# Altium integrated library SMPS_SUPPLY.IntLib: 37 symbols
Pins are listed as number, name and electrical type; pins without a type are passive.

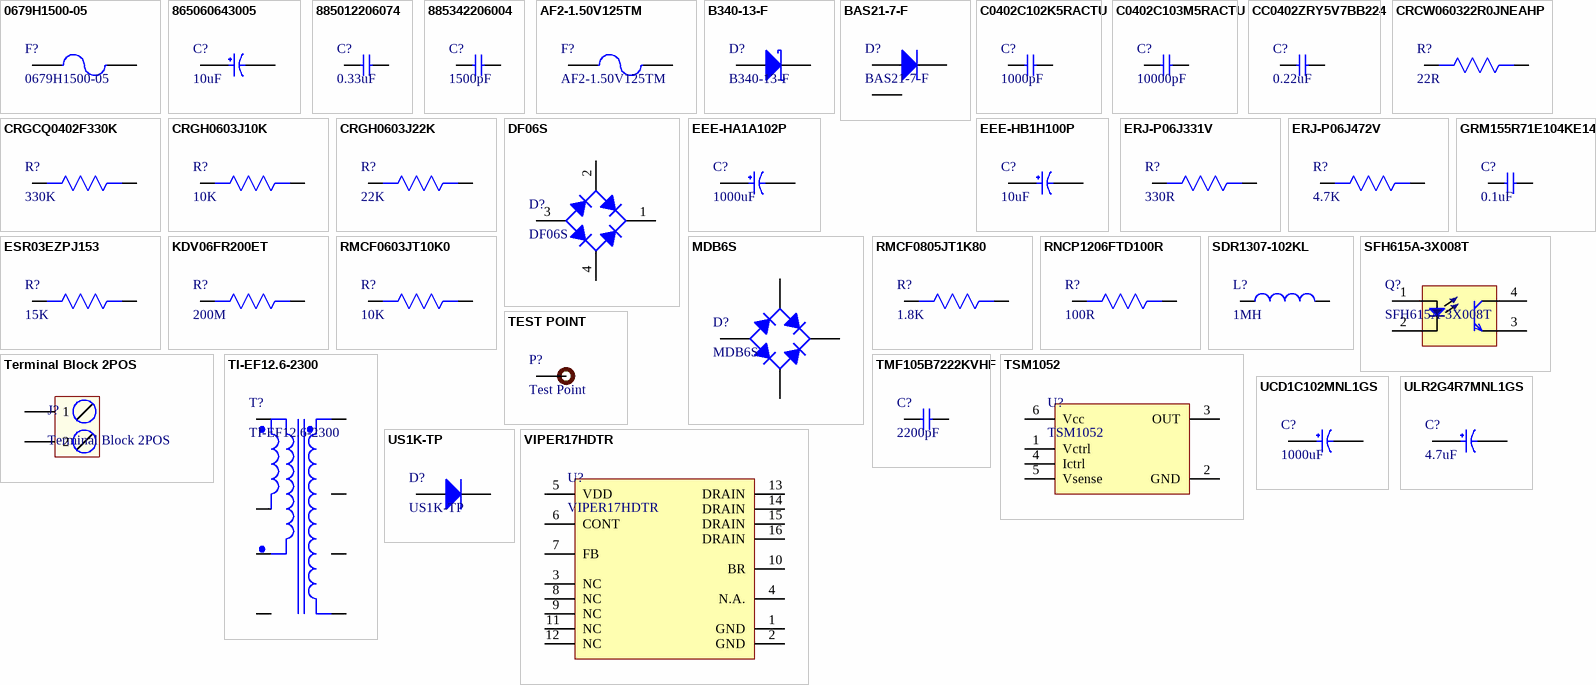
[diagram p0: symbols 0679H1500-05 to VIPER17HDTR]

## 0679H1500-05
designator F?
FUSE BOARD MNT 1.5A 350VAC 72VDC; Manufacturer: Bel; Fuse Type: Board Mount (Cartridge Style Excluded); Voltage Rating (AC): 350V; Voltage Rating (DC): 72V; DC Cold Resistance: 58mR; Approvals: cURus; Supplier 1: Digi-Key; Manufacturer Part Number: 0679H1500-05; Stock 1: 5370; Pricing 1: 1=0.34, 5=0.334, 10=0.319, 50=0.2848, 100=0.2651, 250=0.23564, 500=0.19636, 1000=0.18653 (USD); Mount: Surface Mount; Case/Package: 2410; Case Code (Imperial): 2410; Case Code (Metric): 6125; Min Operating Temperature: -55°C; Max Operating Temperature: 125°C; Packaging: Tape and Reel; Current Rating: 1.5A; ComponentLink1URL: https://www.belfuse.com/resources/CircuitProtection/datasheets/0679H%20Jan%202017.pdf?src-supplier=Digi-Key; ComponentLink1Description: https://www.belfuse.com/resources/CircuitProtection/datasheets/0679H%20Jan%202017.pdf?src-supplier=Digi-Key; Supplier Part Number 1: 507-2048-1-ND
footprint 0679H1500-05
pins: 1, 2

## 865060643005
designator C?, comment 10uF
CAP 10 UF 20% 50 V; Manufacturer: Wurth Electronics; Manufacturer Part Number: 865060643005; Voltage Rating: 50V; Polarity: Polar; Ripple Current: 165mA; Impedance: 1.4R; Life (Hours): 2000Hour; Supplier 1: Digi-Key; Stock 1: 518; Pricing 1: 1=0.27, 50=0.233, 100=0.203, 250=0.18, 500=0.158 (USD); Mount: Surface Mount; Case/Package: Radial; Min Operating Temperature: -55°C; Max Operating Temperature: 105°C; Package Quantity: 1000; Packaging: Cut Tape; Ripple Current (AC): 165mA; Tolerance: 20%; Voltage Rating (DC): 50V; Capacitance: 10uF; Diameter: 6.3mm; Height: 5.5mm; Height - Seated (Max): 0.217inch; REACH SVHC: Unknown; ComponentLink1URL: http://www.farnell.com/datasheets/1880073.pdf?src-supplier=Element14; ComponentLink1Description: http://www.farnell.com/datasheets/1880073.pdf?src-supplier=Element14; ComponentLink2URL: http://www.farnell.com/datasheets/1880073.pdf?src-supplier=Farnell; ComponentLink2Description: http://www.farnell.com/datasheets/1880073.pdf?src-supplier=Farnell; ComponentLink3URL: http://katalog.we-online.de/pbs/datasheet/865060643005.pdf?src-supplier=Digi-Key; ComponentLink3Description: http://katalog.we-online.de/pbs/datasheet/865060643005.pdf?src-supplier=Digi-Key; Supplier Part Number 1: 732-8545-1-ND
footprint 865060643005
pins: 1, 2

## 885012206074
designator C?, comment 0.33uF
CAP CER 0.33UF 25V X7R 0603; Manufacturer: Wurth Electronics; Manufacturer Part Number: 885012206074; Capacitance: 330nF; Tolerance: 10%; Supplier 1: Digi-Key; Stock 1: 20125; Pricing 1: 1=0.1, 10=0.08, 100=0.0721, 500=0.06376 (USD); Mount: Surface Mount; Case/Package: 0603; Case Code (Metric): 1608; Case Code (Imperial): 0603; Min Operating Temperature: -55°C; Max Operating Temperature: 125°C; Packaging: Tape and Reel; Voltage Rating: 25V; Length: 0.063inch; Width: 0.031inch; Thickness: 0.037inch; ComponentLink1URL: http://www.farnell.com/datasheets/2031845.pdf?src-supplier=Element14; ComponentLink1Description: http://www.farnell.com/datasheets/2031845.pdf?src-supplier=Element14; ComponentLink2URL: http://www.farnell.com/datasheets/2031845.pdf?src-supplier=Farnell; ComponentLink2Description: http://www.farnell.com/datasheets/2031845.pdf?src-supplier=Farnell; ComponentLink3URL: https://katalog.we-online.de/pbs/datasheet/885012206074.pdf?src-supplier=Digi-Key; ComponentLink3Description: https://katalog.we-online.de/pbs/datasheet/885012206074.pdf?src-supplier=Digi-Key; ComponentLink4URL: http://www.farnell.com/datasheets/2031845.pdf?src-supplier=Newark; ComponentLink4Description: http://www.farnell.com/datasheets/2031845.pdf?src-supplier=Newark; Supplier Part Number 1: 732-7992-1-ND
footprint Cap0603
pins: 1, 2

## 885342206004
designator C?, comment 1500pF
CAP CER 1500PF 250V X7R 0603; Manufacturer: Wurth Electronics; Manufacturer Part Number: 885342206004; Supplier 1: Digi-Key; Stock 1: 5280; Pricing 1: 1=0.1, 10=0.086, 100=0.0771, 500=0.06822 (USD); Supplier Part Number 1: 732-12172-1-ND
footprint Cap0603
pins: 1, 2

## AF2-1.50V125TM
designator F?
Chip Fuse Fast Blow 1.5A 62mΩ 100A AC，50A AC，50A DC 1.19 2410 Surface Mount Fuses RoHS; Manufacturer: AEM; Manufacturer Part No: AF2-1.50V125TM; Package: 2410; Value: *
footprint AF2-1.50V125TM
pins: 1, 2

## B340-13-F
designator D?
DIODE SCHOTTKY 40V 3A SMC; Manufacturer: Diodes; Element Configuration: Single; Peak Reverse Current: 500uA; Forward Voltage: 500mV; Max Forward Surge Current (Ifsm): 100A; Polarity: Standard; Capacitance: 250pF; Supplier 1: Digi-Key; Manufacturer Part Number: B340-13-F; Stock 1: 80823; Pricing 1: 1=0.35, 10=0.285, 25=0.2604, 100=0.1636, 250=0.1618, 500=0.1515, 1000=0.10302 (USD); Mount: Surface Mount; Case/Package: SMC; Number of Pins: 2; Weight: 0.007408oz; Min Operating Temperature: -55°C; Max Operating Temperature: 125°C; Forward Current: 3A; Max Repetitive Reverse Voltage (Vrrm): 40V; Packaging: Tape and Reel; Peak Non-Repetitive Surge Current: 100A; Package Quantity: 3000; Average Rectified Current: 3A; Termination: SMD/SMT; Voltage Rating (DC): 40V; Current Rating: 3A; Output Current: 3A; Max Reverse Voltage (DC): 40V; Current: 3A; Voltage: 40V; Length: 7.11mm; Height: 2.5mm; Width: 6.22mm; Radiation Hardening: No; Lead Free: Lead Free; REACH SVHC: No SVHC; ComponentLink1URL: https://www.diodes.com/assets/Datasheets/ds30923.pdf?src-supplier=Digi-Key; ComponentLink1Description: https://www.diodes.com/assets/Datasheets/ds30923.pdf?src-supplier=Digi-Key; ComponentLink2URL: http://www.diodes.com/datasheets/ds13005.pdf?src-supplier=Future+Electronics; ComponentLink2Description: http://www.diodes.com/datasheets/ds13005.pdf?src-supplier=Future+Electronics; ComponentLink3URL: https://www.verical.com/server-webapp/html/getDatasheet?partID=116064&src-supplier=Verical; ComponentLink3Description: https://www.verical.com/server-webapp/html/getDatasheet?partID=116064&src-supplier=Verical; Supplier Part Number 1: B340-FDICT-ND
footprint SMC
pins: 1 A, 2 K

## BAS21-7-F
designator D?
DIODE GEN PURP 200V 200MA SOT23; Manufacturer: Diodes; Forward Current: 400mA; Peak Reverse Current: 100nA; Reverse Recovery Time: 50ns; Peak Non-Repetitive Surge Current: 2.5A; Max Repetitive Reverse Voltage (Vrrm): 250V; Element Configuration: Single; Forward Voltage: 1.25V; Power Dissipation: 250mW; Polarity: Standard; Power Rating: 350mW; Capacitance: 5pF; Supplier 1: Digi-Key; Manufacturer Part Number: BAS21-7-F; Stock 1: 164018; Pricing 1: 1=0.13, 10=0.119, 25=0.1136, 100=0.05, 250=0.048, 500=0.03926, 1000=0.02727 (USD); Mount: Surface Mount; Case/Package: SOT-23; Number of Pins: 3; Weight: 0.000282oz; Contact Plating: Tin,Matte; Min Operating Temperature: -65°C; Max Operating Temperature: 150°C; Packaging: Tape and Reel; Max Surge Current: 2.5A; Recovery Time: 50ns; Package Quantity: 3000; Average Rectified Current: 200mA; Output Current: 200mA; Voltage: 250V; Max Reverse Voltage (DC): 200V; Length: 3.05mm; Height: 1mm; Width: 1.4mm; Radiation Hardening: No; Lead Free: Lead Free; ComponentLink1URL: https://www.verical.com/server-webapp/html/getDatasheet?partID=143369&src-supplier=Verical; ComponentLink1Description: https://www.verical.com/server-webapp/html/getDatasheet?partID=143369&src-supplier=Verical; ComponentLink2URL: http://www.diodes.com/datasheets/ds12004.pdf?src-supplier=Avnet+Asia; ComponentLink2Description: http://www.diodes.com/datasheets/ds12004.pdf?src-supplier=Avnet+Asia; ComponentLink3URL: http://www.diodes.com/datasheets/ds12004.pdf?src-supplier=Avnet+Europe; ComponentLink3Description: http://www.diodes.com/datasheets/ds12004.pdf?src-supplier=Avnet+Europe; ComponentLink4URL: http://www.diodes.com/datasheets/ds12004.pdf?src-supplier=Avnet; ComponentLink4Description: http://www.diodes.com/datasheets/ds12004.pdf?src-supplier=Avnet; ComponentLink5URL: http://www.diodes.com/datasheets/ds12004.pdf?src-supplier=Future+Electronics; ComponentLink5Description: http://www.diodes.com/datasheets/ds12004.pdf?src-supplier=Future+Electronics; ComponentLink6URL: https://www.diodes.com/assets/Datasheets/Ds12004.pdf?src-supplier=Digi-Key; ComponentLink6Description: https://www.diodes.com/assets/Datasheets/Ds12004.pdf?src-supplier=Digi-Key; Supplier Part Number 1: BAS21-FDICT-ND
footprint SOT23-3 (SOT23, 3-Leads, Body 2.9x1.3mm, Pitch 0.95mm, Lead Span 2.3mm - Reverse Pinning, IPC High Density)
pins: 1 A, 2 NC, 3 K

## C0402C102K5RACTU
designator C?, comment 1000pF
CAP CER 1000PF 50V X7R 0402; Manufacturer: KEMET; Manufacturer Part Number: C0402C102K5RACTU; Dielectric Material: Ceramic; Capacitance: 1nF; Tolerance: 10%; Dissipation Factor: 2.5%; Supplier 1: Digi-Key; Stock 1: 1339158; Pricing 1: 1=0.1, 10=0.022, 100=0.0099, 500=0.00708, 1000=0.00557, 2500=0.00506, 5000=0.00466 (USD); Mount: Surface Mount,PCB; Case/Package: 0402; Number of Pins: 2; Case Code (Metric): 1005; Case Code (Imperial): 0402; Min Operating Temperature: -55°C; Max Operating Temperature: 125°C; Packaging: Tape and Reel; Voltage Rating (DC): 50V; Dielectric: X7R; Package Quantity: 10000; Voltage Rating: 50V; Termination: SMD/SMT; Voltage: 50V; Length: 1mm; Height: 0.5mm; Width: 0.5mm; Thickness: 0.022inch; Lead Pitch: 0.3mm; Depth: 0.5mm; Radiation Hardening: No; REACH SVHC: No SVHC; ComponentLink1URL: http://www.onlinecomponents.com/productFiles/mf-KEM/docfinderpartnumberc0402c102k5ractu.pdf?src-supplier=Onlinecomponents.com; ComponentLink1Description: http://www.onlinecomponents.com/productFiles/mf-KEM/docfinderpartnumberc0402c102k5ractu.pdf?src-supplier=Onlinecomponents.com; ComponentLink2URL: http://www.alliedelec.com/m/d/9bfe7773041ffe9d406e68bc7b377fdd.pdf?src-supplier=Allied+Electronics; ComponentLink2Description: http://www.alliedelec.com/m/d/9bfe7773041ffe9d406e68bc7b377fdd.pdf?src-supplier=Allied+Electronics; ComponentLink3URL: http://www.farnell.com/datasheets/2740642.pdf?src-supplier=Element14; ComponentLink3Description: http://www.farnell.com/datasheets/2740642.pdf?src-supplier=Element14; ComponentLink4URL: http://www.kemet.com/kemet/web/homepage/kechome.nsf/vapubfiles/KEM_C1002_X7R_SMD.pdf/$file/KEM_C1002_X7R_SMD.pdf?src-supplier=Farnell; ComponentLink4Description: http://www.kemet.com/kemet/web/homepage/kechome.nsf/vapubfiles/KEM_C1002_X7R_SMD.pdf/$file/KEM_C1002_X7R_SMD.pdf?src-supplier=Farnell; ComponentLink5URL: http://www.farnell.com/datasheets/1918693.pdf?src-supplier=Element14; ComponentLink5Description: http://www.farnell.com/datasheets/1918693.pdf?src-supplier=Element14; ComponentLink6URL: http://www.mouser.com/ds/2/212/KEM_C1002_X7R_SMD-1102033.pdf?src-supplier=Mouser; ComponentLink6Description: http://www.mouser.com/ds/2/212/KEM_C1002_X7R_SMD-1102033.pdf?src-supplier=Mouser; Supplier Part Number 1: 399-1032-1-ND
footprint Cap0402
pins: 1, 2

## C0402C103M5RACTU
designator C?, comment 10000pF
CAP CER 10000PF 50V X7R 0402; Manufacturer: KEMET; Manufacturer Part Number: C0402C103M5RACTU; Dielectric Material: Ceramic; Capacitance: 10nF; Tolerance: 20%; Dissipation Factor: 2.5%; Supplier 1: Digi-Key; Stock 1: 100871; Pricing 1: 1=0.1, 10=0.022, 100=0.0099, 500=0.00708, 1000=0.00557, 2500=0.00506, 5000=0.00466 (USD); Mount: Surface Mount; Case/Package: 0402; Case Code (Metric): 1005; Case Code (Imperial): 0402; Min Operating Temperature: -55°C; Max Operating Temperature: 125°C; Voltage Rating: 50V; Packaging: Tape and Reel; Package Quantity: 10000; Voltage Rating (DC): 50V; Dielectric: X7R; Termination: SMD/SMT; Length: 1mm; Height: 0.5mm; Width: 0.02inch; Thickness: 0.022inch; Lead Pitch: 0.3mm; Depth: 0.5mm; Radiation Hardening: No; ComponentLink1URL: https://www.verical.com/server-webapp/html/getDatasheet?partID=439437&src-supplier=Verical; ComponentLink1Description: https://www.verical.com/server-webapp/html/getDatasheet?partID=439437&src-supplier=Verical; ComponentLink2URL: http://www.mouser.com/ds/2/212/KEM_C1002_X7R_SMD-1102033.pdf?src-supplier=Mouser; ComponentLink2Description: http://www.mouser.com/ds/2/212/KEM_C1002_X7R_SMD-1102033.pdf?src-supplier=Mouser; Supplier Part Number 1: 399-7760-1-ND
footprint Cap0402
pins: 1, 2

## CC0402ZRY5V7BB224
designator C?, comment 0.22uF
CAP CER 0.22UF 16V Y5V 0402; Manufacturer: Yageo; Manufacturer Part Number: CC0402ZRY5V7BB224; Capacitance: 220nF; Tolerance: 80%; Supplier 1: Digi-Key; Stock 1: 177873; Pricing 1: 1=0.1, 10=0.073, 100=0.0327, 500=0.02336, 1000=0.01836, 2500=0.01669, 5000=0.01536 (USD); Mount: Surface Mount; Case/Package: 0402; Number of Pins: 2; Weight: 2.3E-05oz; Case Code (Imperial): 0402; Case Code (Metric): 1005; Min Operating Temperature: -30°C; Max Operating Temperature: 85°C; Voltage Rating: 16V; Voltage Rating (DC): 16V; Packaging: Tape and Reel; Package Quantity: 1; Dielectric: Y5V; Termination: SMD/SMT; Composition: Ceramic; Length: 1mm; Width: 0.5mm; Thickness: 0.022inch; Depth: 0.5mm; Lead Free: Lead Free; Halogen Free: Halogen Free; ComponentLink1URL: http://www.yageo.com/documents/recent/UPY-GPHC_Y5V_6.3V-to-50V_8.pdf?src-supplier=Digi-Key; ComponentLink1Description: http://www.yageo.com/documents/recent/UPY-GPHC_Y5V_6.3V-to-50V_8.pdf?src-supplier=Digi-Key; ComponentLink2URL: http://media.digikey.com/pdf/Data%20Sheets/Yageo%20PDFs/MLCC%20ordering%20code.pdf?src-supplier=Digi-Key; ComponentLink2Description: http://media.digikey.com/pdf/Data%20Sheets/Yageo%20PDFs/MLCC%20ordering%20code.pdf?src-supplier=Digi-Key; Supplier Part Number 1: 311-1350-1-ND
footprint Cap0402
pins: 1, 2

## CRCW060322R0JNEAHP
designator R?, comment 22R
RES SMD 22 OHM 5% 1/3W 0603; Manufacturer: Vishay Dale; Manufacturer Part Number: CRCW060322R0JNEAHP; Temperature Coefficient: 200ppm/°C; Power Rating: 250mW; Voltage Rating: 75V; Supplier 1: Digi-Key; Stock 1: 245392; Pricing 1: 1=0.15, 10=0.129, 100=0.0506, 1000=0.02119, 2500=0.01942 (USD); Mount: Surface Mount; Case/Package: 0603; Weight: 7.1E-05oz; Contact Plating: Tin; Case Code (Imperial): 0603; Case Code (Metric): 1608; Min Operating Temperature: -55°C; Max Operating Temperature: 155°C; Resistance: 22R; Tolerance: 5%; Composition: Thick Film; Packaging: Tape and Reel; Package Quantity: 5000; Military Standard: Not; Length: 1.6mm; Height: 0.45mm; Width: 0.8mm; Depth: 0.85mm; Radiation Hardening: No; Lead Free: Lead Free; ComponentLink1URL: http://www.vishay.com/docs/20043/crcwhpe3.pdf?src-supplier=Avnet+Europe; ComponentLink1Description: http://www.vishay.com/docs/20043/crcwhpe3.pdf?src-supplier=Avnet+Europe; ComponentLink2URL: http://www.mouser.com/ds/2/427/dcrcwe3-109170.pdf?src-supplier=Mouser; ComponentLink2Description: http://www.mouser.com/ds/2/427/dcrcwe3-109170.pdf?src-supplier=Mouser; Supplier Part Number 1: 541-22SACT-ND
footprint Res0603
pins: 1, 2

## CRGCQ0402F330K
designator R?, comment 330K
CRGCQ 0402 330K 1%; Manufacturer: TE Connectivity; Manufacturer Part Number: CRGCQ0402F330K; Supplier 1: Digi-Key; Stock 1: 159390; Pricing 1: 1=0.1, 10=0.021, 100=0.0086, 1000=0.00387, 2500=0.00336, 5000=0.00277 (USD); ComponentLink1URL: https://www.te.com/commerce/DocumentDelivery/DDEController?Action=srchrtrv&amp;DocNm=1773204-3&amp;DocType=DS&amp;DocLang=English&src-supplier=Digi-Key; ComponentLink1Description: https://www.te.com/commerce/DocumentDelivery/DDEController?Action=srchrtrv&amp;DocNm=1773204-3&amp;DocType=DS&amp;DocLang=English&src-supplier=Digi-Key; ComponentLink2URL: https://4donline.ihs.com/images/VipMasterIC/IC/TYEL/TYEL-S-A0004929575/TYEL-S-A0004929575-1.pdf?hkey=52A5661711E402568146F3353EA87419&src-supplier=Element14; ComponentLink2Description: https://4donline.ihs.com/images/VipMasterIC/IC/TYEL/TYEL-S-A0004929575/TYEL-S-A0004929575-1.pdf?hkey=52A5661711E402568146F3353EA87419&src-supplier=Element14; Supplier Part Number 1: A129657CT-ND
footprint Res0402
pins: 1, 2

## CRGH0603J10K
designator R?, comment 10K
RES SMD 10K OHM 5% 1/5W 0603; Manufacturer: TE Connectivity Holsworthy; Manufacturer Part Number: CRGH0603J10K; Resistance: 10kR; Temperature Coefficient: 100ppm/°C; Power Rating: 200mW; Voltage Rating: 50V; Number of Resistors: 1; Supplier 1: Digi-Key; Stock 1: 55163; Pricing 1: 1=0.1, 10=0.047, 100=0.0192, 1000=0.00861, 2500=0.00748 (USD); Mount: Surface Mount; Case/Package: 0603; Case Code (Imperial): 0603; Case Code (Metric): 1608; Min Operating Temperature: -55°C; Max Operating Temperature: 125°C; Tolerance: 5%; Packaging: Tape and Reel; Composition: Thick Film,Power resistor; Number of Terminations: 2; Termination: Solder; Voltage Rating (DC): 50V; Length: 1.6mm; Height: 0.45mm; Width: 0.8mm; Depth: 0.8mm; REACH SVHC: No SVHC; ELV: Compliant; ComponentLink1URL: http://www.farnell.com/datasheets/2007183.pdf?src-supplier=Element14; ComponentLink1Description: http://www.farnell.com/datasheets/2007183.pdf?src-supplier=Element14; Supplier Part Number 1: A126394CT-ND
footprint Res0603
pins: 1, 2

## CRGH0603J22K
designator R?, comment 22K
RES SMD 22K OHM 5% 1/5W 0603; Manufacturer: TE Connectivity; Manufacturer Part Number: CRGH0603J22K; Resistance: 22kR; Temperature Coefficient: 100ppm/°C; Power Rating: 200mW; Voltage Rating: 50V; Number of Resistors: 1; Supplier 1: Digi-Key; Stock 1: 19298; Pricing 1: 1=0.1, 10=0.047, 100=0.0192, 1000=0.00861, 2500=0.00748 (USD); Mount: Surface Mount; Case/Package: 0603; Weight: 7.1E-05oz; Case Code (Imperial): 0603; Case Code (Metric): 1608; Min Operating Temperature: -55°C; Max Operating Temperature: 125°C; Tolerance: 5%; Packaging: Tape and Reel; Composition: Thick Film,Power resistor; Package Quantity: 5000; Number of Terminations: 2; Termination: Solder; Voltage Rating (DC): 50V; Length: 1.6mm; Height: 0.45mm; Width: 0.8mm; Depth: 0.8mm; REACH SVHC: No SVHC; ELV: Compliant; ComponentLink1URL: http://www.farnell.com/datasheets/2007183.pdf?src-supplier=Element14; ComponentLink1Description: http://www.farnell.com/datasheets/2007183.pdf?src-supplier=Element14; ComponentLink2URL: http://www.mouser.com/ds/2/418/NG_DS_1773204-1_C-729102.pdf?src-supplier=Mouser; ComponentLink2Description: http://www.mouser.com/ds/2/418/NG_DS_1773204-1_C-729102.pdf?src-supplier=Mouser; Supplier Part Number 1: A126403CT-ND
footprint Res0603
pins: 1, 2

## DF06S
designator D?
BRIDGE RECT 1PHASE 600V 1A DF-S; Manufacturer: ON Semiconductor / Fairchild; Forward Voltage: 1.1V; Peak Reverse Current: 5uA; Peak Non-Repetitive Surge Current: 50A; Element Configuration: Single; Number of Elements: 1; Forward Current: 1.5A; Capacitance: 1nF; Max Reverse Leakage Current: 50uA; Tolerance: 5%; Voltage Rating: 100V; Power Dissipation: 3.1W; Supplier 1: Digi-Key; Manufacturer Part Number: DF06S; Stock 1: 3050; Pricing 1: 1=0.5, 10=0.425, 25=0.3964, 100=0.2946, 500=0.23 (USD); Mount: Through Hole; Case/Package: SMD/SMT; Number of Pins: 4; Weight: 0.484g; Case Code (Metric): 1608; Case Code (Imperial): 0603; Min Operating Temperature: -55°C; Max Operating Temperature: 150°C; Packaging: Tape and Reel; Max Repetitive Reverse Voltage (Vrrm): 600V; Max Surge Current: 50A; Package Quantity: 10000; Current Rating: 1.5A; Voltage Rating (DC): 600V; Output Current: 1.5A; Max Forward Surge Current (Ifsm): 50A; Average Rectified Current: 1.5A; Termination: SMD/SMT; Max Power Dissipation: 3.1W; Length: 0.063inch; Height: 3.3mm; Width: 6.5mm; Thickness: 0.035inch; Radiation Hardening: No; Lead Free: Lead Free; REACH SVHC: No SVHC; ComponentLink1URL: http://www.farnell.com/datasheets/2161293.pdf?src-supplier=Element14; ComponentLink1Description: http://www.farnell.com/datasheets/2161293.pdf?src-supplier=Element14; ComponentLink2URL: https://www.fairchildsemi.com/datasheets/DF/DF08S.pdf?src-supplier=Avnet; ComponentLink2Description: https://www.fairchildsemi.com/datasheets/DF/DF08S.pdf?src-supplier=Avnet; ComponentLink3URL: http://www.fairchildsemi.com/ds/DF/DF08S.pdf?src-supplier=Avnet+Europe; ComponentLink3Description: http://www.fairchildsemi.com/ds/DF/DF08S.pdf?src-supplier=Avnet+Europe; ComponentLink4URL: http://www.fairchildsemi.com/ds/DF/DF06S.pdf?src-supplier=Future+Electronics; ComponentLink4Description: http://www.fairchildsemi.com/ds/DF/DF06S.pdf?src-supplier=Future+Electronics; ComponentLink5URL: https://www.fairchildsemi.com/datasheets/DF/DF005S.pdf?src-supplier=Digi-Key; ComponentLink5Description: https://www.fairchildsemi.com/datasheets/DF/DF005S.pdf?src-supplier=Digi-Key; ComponentLink6URL: http://www.mouser.com/ds/2/149/DF06S-190284.pdf?src-supplier=Mouser; ComponentLink6Description: http://www.mouser.com/ds/2/149/DF06S-190284.pdf?src-supplier=Mouser; ComponentLink7URL: http://datasheet.iiic.cc/fairchild/DF06S.pdf?src-supplier=IIIC; ComponentLink7Description: http://datasheet.iiic.cc/fairchild/DF06S.pdf?src-supplier=IIIC; Supplier Part Number 1: DF06SCT-ND
footprint DF-S
pins: 1 +, 2 -, 3 ~, 4 ~

## EEE-HA1A102P
designator C?, comment 1000uF
CAP ALUM 1000UF 20% 10V SMD; Manufacturer: Panasonic; Manufacturer Part Number: EEE-HA1A102P; Capacitance: 1mF; Ripple Current: 400mA; Polarity: Polar; Life (Hours): 1000Hour; Lead Diameter: 0.9mm; Supplier 1: Digi-Key; Stock 1: 7455; Pricing 1: 1=0.68, 10=0.502, 50=0.4014, 100=0.344 (USD); Mount: Surface Mount,PCB; Case/Package: Radial; Contact Plating: Tin; Min Operating Temperature: -40°C; Max Operating Temperature: 105°C; Tolerance: 20%; Voltage Rating: 10V; Packaging: Tape and Reel; Package Quantity: 500; Ripple Current (AC): 400mA; Voltage Rating (DC): 10V; Termination: SMD/SMT; Voltage: 10V; Diameter: 10mm; Length: 10.5mm; Height: 10.2mm; Lead Pitch: 4.6mm; Height - Seated (Max): 0.402inch; Width: 900um; Radiation Hardening: No; REACH SVHC: No SVHC; Lead Free: Lead Free; ComponentLink1URL: https://industrial.panasonic.com/cdbs/www-data/pdf/RDE0000/ABA0000C1151.pdf?src-supplier=Digi-Key; ComponentLink1Description: https://industrial.panasonic.com/cdbs/www-data/pdf/RDE0000/ABA0000C1151.pdf?src-supplier=Digi-Key; ComponentLink2URL: http://www.farnell.com/datasheets/1446029.pdf?src-supplier=Farnell; ComponentLink2Description: http://www.farnell.com/datasheets/1446029.pdf?src-supplier=Farnell; ComponentLink3URL: https://www.alliedelec.com/m/d/7ecf71cebe655f70ab90926cc286bede.pdf?src-supplier=Allied+Electronics; ComponentLink3Description: https://www.alliedelec.com/m/d/7ecf71cebe655f70ab90926cc286bede.pdf?src-supplier=Allied+Electronics; ComponentLink4URL: http://industrial.panasonic.com/www-data/pdf/ABA0000/ABA0000CE3.pdf?src-supplier=Future+Electronics; ComponentLink4Description: http://industrial.panasonic.com/www-data/pdf/ABA0000/ABA0000CE3.pdf?src-supplier=Future+Electronics; ComponentLink5URL: http://www.mouser.com/ds/2/315/ABA0000C1151-947454.pdf?src-supplier=Mouser; ComponentLink5Description: http://www.mouser.com/ds/2/315/ABA0000C1151-947454.pdf?src-supplier=Mouser; ComponentLink6URL: http://industrial.panasonic.com/www-data/pdf/ABA0000/ABA0000CE3.pdf?src-supplier=Avnet; ComponentLink6Description: http://industrial.panasonic.com/www-data/pdf/ABA0000/ABA0000CE3.pdf?src-supplier=Avnet; ComponentLink7URL: http://uk.rs-online.com/webdocs/102e/0900766b8102e3f9.pdf?src-supplier=RSComponents; ComponentLink7Description: http://uk.rs-online.com/webdocs/102e/0900766b8102e3f9.pdf?src-supplier=RSComponents; ComponentLink8URL: http://www.farnell.com/datasheets/1446029.pdf?src-supplier=Element14; ComponentLink8Description: http://www.farnell.com/datasheets/1446029.pdf?src-supplier=Element14; Supplier Part Number 1: PCE4170CT-ND
footprint EEE-HA1A102P
pins: 1, 2

## EEE-HB1H100P
designator C?, comment 10uF
CAP ALUM 10UF 20% 50V SMD; Manufacturer: Panasonic; Manufacturer Part Number: EEE-HB1H100P; Dielectric Material: Aluminium; Ripple Current: 35mA; Life (Hours): 2000Hour; Leakage Current: 3uA; Lead Length: 2.6mm; Supplier 1: Digi-Key; Stock 1: 0; Pricing 1: 1=0.4, 10=0.274, 50=0.1922, 100=0.1647, 500=0.1235 (USD); Mount: Surface Mount,PCB; Case/Package: Radial; Number of Pins: 2; Contact Plating: Tin; Min Operating Temperature: -40°C; Max Operating Temperature: 105°C; Capacitance: 10uF; Tolerance: 20%; Voltage Rating: 50V; Voltage Rating (DC): 50V; Packaging: Tape and Reel; Package Quantity: 1000; Ripple Current (AC): 35mA; Termination: SMD/SMT; Voltage: 50V; Diameter: 6.3mm; Length: 5.5mm; Height: 5.8mm; Height - Seated (Max): 0.228inch; Width: 6.6mm; Lead Pitch: 1.8mm; Radiation Hardening: No; REACH SVHC: No SVHC; Lead Free: Lead Free; ComponentLink1URL: http://uk.rs-online.com/webdocs/06bc/0900766b806bc524.pdf?src-supplier=RSComponents; ComponentLink1Description: http://uk.rs-online.com/webdocs/06bc/0900766b806bc524.pdf?src-supplier=RSComponents; ComponentLink2URL: https://www.alliedelec.com/m/d/756682ced85e7cfe6c5a2ad13d4eb8bb.pdf?src-supplier=Allied+Electronics; ComponentLink2Description: https://www.alliedelec.com/m/d/756682ced85e7cfe6c5a2ad13d4eb8bb.pdf?src-supplier=Allied+Electronics; ComponentLink3URL: http://industrial.panasonic.com/www-data/pdf/ABA0000/ABA0000CE4.pdf?src-supplier=Avnet+Europe; ComponentLink3Description: http://industrial.panasonic.com/www-data/pdf/ABA0000/ABA0000CE4.pdf?src-supplier=Avnet+Europe; ComponentLink4URL: https://industrial.panasonic.com/cdbs/www-data/pdf/RDE0000/ABA0000C1157.pdf?src-supplier=Future+Electronics; ComponentLink4Description: https://industrial.panasonic.com/cdbs/www-data/pdf/RDE0000/ABA0000C1157.pdf?src-supplier=Future+Electronics; ComponentLink5URL: https://www.verical.com/server-webapp/html/getDatasheet?partID=52285&src-supplier=Verical; ComponentLink5Description: https://www.verical.com/server-webapp/html/getDatasheet?partID=52285&src-supplier=Verical; ComponentLink6URL: http://industrial.panasonic.com/www-data/pdf/ABA0000/ABA0000CE4.pdf?src-supplier=Avnet; ComponentLink6Description: http://industrial.panasonic.com/www-data/pdf/ABA0000/ABA0000CE4.pdf?src-supplier=Avnet; Supplier Part Number 1: PCE4143CT-ND
footprint EEE-HB1H100P
pins: 1, 2

## ERJ-P06J331V
designator R?, comment 330R
RES SMD 330 OHM 5% 1/2W 0805
footprint RES 0805 (SMD 0805)
pins: 1, 2

## ERJ-P06J472V
designator R?, comment 4.7K
RES SMD 4.7K OHM 5% 1/2W 0805; Manufacturer: Panasonic; Manufacturer Part Number: ERJ-P06J472V; Resistance: 4.7kR; Temperature Coefficient: 200ppm/°C; Power Rating: 500mW; Voltage Rating: 400V; Voltage Rating (DC): 150V; Supplier 1: Digi-Key; Stock 1: 52373; Pricing 1: 1=0.11, 10=0.103, 100=0.0396, 1000=0.01742, 2500=0.01505 (USD); Mount: Surface Mount; Case/Package: 0805; Contact Plating: Tin; Case Code (Imperial): 0805; Case Code (Metric): 2012; Min Operating Temperature: -55°C; Max Operating Temperature: 155°C; Tolerance: 5%; Composition: Thick Film; Packaging: Tape and Reel; Package Quantity: 1; Termination: SMD/SMT; Number of Terminations: 2; Military Standard: Not; Max Power Dissipation: 500mW; Features: Automotive AEC-Q200; Length: 2mm; Height: 0.6mm; Width: 1.2mm; Depth: 1.25mm; Radiation Hardening: No; REACH SVHC: Unknown; Lead Free: Lead Free; ComponentLink1URL: http://industrial.panasonic.com/www-data/pdf/AOA0000/AOA0000CE4.pdf?src-supplier=Avnet+Europe; ComponentLink1Description: http://industrial.panasonic.com/www-data/pdf/AOA0000/AOA0000CE4.pdf?src-supplier=Avnet+Europe; ComponentLink2URL: http://uk.rs-online.com/webdocs/12cb/0900766b812cb812.pdf?src-supplier=RSComponents; ComponentLink2Description: http://uk.rs-online.com/webdocs/12cb/0900766b812cb812.pdf?src-supplier=RSComponents; ComponentLink3URL: https://www.alliedelec.com/m/d/12e4be79354a6c30aae91f11e8182ea0.pdf?src-supplier=Allied+Electronics; ComponentLink3Description: https://www.alliedelec.com/m/d/12e4be79354a6c30aae91f11e8182ea0.pdf?src-supplier=Allied+Electronics; ComponentLink4URL: http://www.farnell.com/datasheets/2059624.pdf?src-supplier=Element14; ComponentLink4Description: http://www.farnell.com/datasheets/2059624.pdf?src-supplier=Element14; Supplier Part Number 1: P4.7KADCT-ND
footprint RES 0805 (SMD 0805)
pins: 1, 2

## ESR03EZPJ153
designator R?, comment 15K
RES SMD 15K OHM 5% 1/4W 0603; Manufacturer: Rohm; Manufacturer Part Number: ESR03EZPJ153; Resistance: 15kR; Max Power Dissipation: 250mW; Temperature Coefficient: 200ppm/°C; Supplier 1: Digi-Key; Stock 1: 3694; Pricing 1: 1=0.1, 10=0.079, 100=0.0303, 1000=0.01331, 2500=0.0115 (USD); Case/Package: 0603; Case Code (Metric): 1608; Case Code (Imperial): 0603; Min Operating Temperature: -55°C; Max Operating Temperature: 155°C; Package Quantity: 1; Tolerance: 5%; Packaging: Tape and Reel; Composition: Thick Film; Number of Terminations: 2; Features: Automotive AEC-Q200; Length: 0.063inch; Height: 0.022inch; Width: 0.031inch; ComponentLink1URL: http://www.rohm.com/web/global/datasheet/ESR01MZPF/esr-e?src-supplier=Digi-Key; ComponentLink1Description: http://www.rohm.com/web/global/datasheet/ESR01MZPF/esr-e?src-supplier=Digi-Key; Supplier Part Number 1: RHM15KDCT-ND
footprint Res0603
pins: 1, 2

## GRM155R71E104KE14J
designator C?, comment 0.1uF
CAP CER 0.1UF 25V X7R 0402; Manufacturer: Murata; Manufacturer Part Number: GRM155R71E104KE14J; Capacitance: 100nF; Tolerance: 10%; Supplier 1: Digi-Key; Stock 1: 175947; Pricing 1: 1=0.1, 10=0.031, 100=0.0136, 500=0.00974, 1000=0.00765, 2500=0.00696, 5000=0.0064 (USD); Mount: Surface Mount; Case/Package: 0402; Weight: 0.000212oz; Case Code (Imperial): 0402; Case Code (Metric): 1005; Min Operating Temperature: -55°C; Max Operating Temperature: 125°C; Packaging: Tape and Reel; Voltage Rating: 25V; Dielectric: X7R; Termination: SMD/SMT; Composition: Ceramic; Voltage Rating (DC): 25V; Package Quantity: 50000; Length: 0.039inch; Height: 0.5mm; Width: 0.5mm; Thickness: 0.022inch; ComponentLink1URL: http://www.mouser.com/ds/2/281/c02e-2905.pdf?src-supplier=Mouser; ComponentLink1Description: http://www.mouser.com/ds/2/281/c02e-2905.pdf?src-supplier=Mouser; ComponentLink2URL: http://search.murata.co.jp/Ceramy/image/img/A01X/G101/ENG/GRM155R71E104KE14-01.pdf?src-supplier=Digi-Key; ComponentLink2Description: http://search.murata.co.jp/Ceramy/image/img/A01X/G101/ENG/GRM155R71E104KE14-01.pdf?src-supplier=Digi-Key; Supplier Part Number 1: 490-14603-1-ND
footprint Cap0402
pins: 1, 2

## KDV06FR200ET
designator R?, comment 200M
RES 200M OHM 1% 1/5W 0603; Manufacturer: Ohmite; Manufacturer Part Number: KDV06FR200ET; Supplier 1: Digi-Key; Stock 1: 3690; Pricing 1: 1=0.29, 10=0.242, 25=0.176, 50=0.1276, 100=0.0946, 250=0.0726, 500=0.0572, 1000=0.0396 (USD); Supplier Part Number 1: 273-KDV06FR200ETCT-ND
footprint Res0603
pins: 1, 2

## MDB6S
designator D?
BRIDGE RECT 1P 600V 1A MICRODIP
footprint 4-MicroDIP/SMD
pins: 1 +, 2 -, 3 C, 4 C

## RMCF0603JT10K0
designator R?, comment 10K
RES 10K OHM 5% 1/10W 0603; Manufacturer: Stackpole Electronics; Manufacturer Part Number: RMCF0603JT10K0; Power Rating: 100mW; Resistance: 10kR; Temperature Coefficient: 100ppm/°C; Supplier 1: Digi-Key; Stock 1: 2393993; Pricing 1: 1=0.1, 10=0.014, 100=0.0058, 1000=0.00262, 2500=0.00228 (USD); Mount: Surface Mount; Case/Package: 0603; Case Code (Metric): 1608; Case Code (Imperial): 0603; Contact Plating: Tin,Matte; Min Operating Temperature: -55°C; Max Operating Temperature: 155°C; Tolerance: 5%; Packaging: Tape and Reel; Composition: Thick Film; Number of Terminations: 2; Military Standard: Not; Max Power Dissipation: 100mW; Features: Automotive AEC-Q200; Length: 1.55mm; Height: 0.022inch; Width: 0.031inch; Depth: 0.8mm; Radiation Hardening: No; Lead Free: Lead Free; ComponentLink1URL: https://www.verical.com/server-webapp/html/getDatasheet?partID=364254&src-supplier=Verical; ComponentLink1Description: https://www.verical.com/server-webapp/html/getDatasheet?partID=364254&src-supplier=Verical; Supplier Part Number 1: RMCF0603JT10K0CT-ND
footprint Res0603
pins: 1, 2

## RMCF0805JT1K80
designator R?, comment 1.8K
RES 1.8K OHM 5% 1/8W 0805; Manufacturer: Stackpole Electronics; Manufacturer Part Number: RMCF0805JT1K80; Resistance: 1.8kR; Max Power Dissipation: 125mW; Temperature Coefficient: 200ppm/°C; Supplier 1: Digi-Key; Stock 1: 63219; Pricing 1: 1=0.1, 10=0.019, 100=0.0078, 1000=0.0035, 2500=0.00304 (USD); Mount: Surface Mount; Case/Package: 0805; Case Code (Metric): 2012; Case Code (Imperial): 0805; Contact Plating: Tin,Matte; Min Operating Temperature: -55°C; Max Operating Temperature: 155°C; Tolerance: 5%; Packaging: Tape and Reel; Composition: Thick Film; Number of Terminations: 2; Features: Automotive AEC-Q200; Length: 0.079inch; Height: 0.026inch; Width: 0.049inch; Radiation Hardening: No; Lead Free: Lead Free; Supplier Part Number 1: RMCF0805JT1K80CT-ND
footprint RES 0805 (SMD 0805)
pins: 1, 2

## RNCP1206FTD100R
designator R?, comment 100R
RES 100 OHM 1% 1/2W 1206; Manufacturer: Stackpole Electronics; Manufacturer Part Number: RNCP1206FTD100R; Max Power Dissipation: 500mW; Temperature Coefficient: 100ppm/°C; Supplier 1: Digi-Key; Stock 1: 60612; Pricing 1: 1=0.1, 10=0.089, 100=0.0341, 1000=0.015, 2500=0.01296 (USD); Mount: Surface Mount; Case/Package: 1206; Case Code (Metric): 3216; Case Code (Imperial): 1206; Contact Plating: Tin; Min Operating Temperature: -55°C; Max Operating Temperature: 155°C; Resistance: 100R; Tolerance: 1%; Packaging: Tape and Reel; Composition: Thin Film; Number of Terminations: 2; Features: Moisture Resistant,Anti-Sulfur; Length: 0.122inch; Height: 0.024inch; Width: 0.059inch; Radiation Hardening: No; ComponentLink1URL: https://www.seielect.com/catalog/sei-rncp.pdf?src-supplier=Digi-Key; ComponentLink1Description: https://www.seielect.com/catalog/sei-rncp.pdf?src-supplier=Digi-Key; ComponentLink2URL: http://www.seielect.com/Catalog/SEI-rncp.pdf?src-supplier=Avnet; ComponentLink2Description: http://www.seielect.com/Catalog/SEI-rncp.pdf?src-supplier=Avnet; Supplier Part Number 1: RNCP1206FTD100RCT-ND
footprint Res1206
pins: 1, 2

## SDR1307-102KL
designator L?, comment 1MH
FIXED IND 1MH 650MA 1.6 OHM SMD; Manufacturer: Bourns; Manufacturer Part Number: SDR1307-102KL; Core Material: Ferrite; Tolerance: 10%; DC Resistance (DCR): 1.6R; Saturation Current: 1A; Shielding: Unshielded; Q Factor: 10; Self Resonant Frequency: 1.4MHz; Test Frequency: 100kHz; Supplier 1: Digi-Key; Stock 1: 12475; Pricing 1: 1=1.05, 10=0.972, 100=0.7027 (USD); Mount: Surface Mount; Case/Package: Nonstandard; Min Operating Temperature: -40°C; Max Operating Temperature: 125°C; Inductance: 1mH; Max DC Current: 650mA; Package Quantity: 400; Current Rating: 650mA; Packaging: Tape and Reel; Inductance Tolerance: 10%; Composition: Wirewound; Termination: SMD/SMT; RMS Current (Irms): 650mA; DC Current: 650mA; Military Standard: Not; Length: 0.512inch; Height: 0.1mm; Width: 0.512inch; Height - Seated (Max): 0.288inch; Radiation Hardening: No; REACH SVHC: No SVHC; ComponentLink1URL: http://www.bourns.com/docs/Product-Datasheets/SDR1307.pdf?src-supplier=Digi-Key; ComponentLink1Description: http://www.bourns.com/docs/Product-Datasheets/SDR1307.pdf?src-supplier=Digi-Key; ComponentLink2URL: http://www.bourns.com/data/global/pdfs/SDR1307.pdf?src-supplier=Avnet+Europe; ComponentLink2Description: http://www.bourns.com/data/global/pdfs/SDR1307.pdf?src-supplier=Avnet+Europe; ComponentLink3URL: http://www.bourns.com/data/global/pdfs/SDR1307.pdf?src-supplier=Avnet; ComponentLink3Description: http://www.bourns.com/data/global/pdfs/SDR1307.pdf?src-supplier=Avnet; Supplier Part Number 1: SDR1307-102KLCT-ND
footprint SDR1307-102KL
pins: 1, 2

## SFH615A-3X008T
designator Q?
OPTOISOLATOR 5.3KV TRANS 4SMD
footprint SFH615A-3X008T
pins: 1 An, 2 Ca, 3 E, 4 C

## Terminal Block 2POS
designator J?
TERMINAL BLOCK 2POS 5.08MM SIDE; Manufacturer: TE Connectivity; Manufacturer P/N: 1776493-2
footprint Terminal Block 2P (TERMINAL BLOCK 2POS 5.08MM SIDE)
pins: 1, 2

## TEST POINT
designator P?, comment Test Point
Test Point ON
footprint TEST POINT
pins: 1

## TI-EF12.6-2300
designator T?
Transformer: impulse; power supply; 3W; Works with: TNY264; 1.25m; Manufacturer: FERYSTER; Value: Custom; Manufacturer Part No: TI-EF12.6-2300; Package: Custom
footprint TI-EF12.6-2300
pins: 1, 2, 3, 4, 5, 6, 7, 8

## TMF105B7222KVHF
designator C?, comment 2200pF
CAP, MLCC, 0402/1005, 25V, X7R,; Manufacturer: Taiyo Yuden; Manufacturer Part Number: TMF105B7222KVHF; Supplier 1: Digi-Key; Stock 1: 19980; Pricing 1: 1=0.1, 10=0.058, 100=0.026, 500=0.0186, 1000=0.01461, 2500=0.01328, 5000=0.01222 (USD); Supplier Part Number 1: 587-6586-1-ND
footprint Cap0402
pins: 1, 2

## TSM1052
designator U?
IC CONTROLLER CC/CV SMPS SOT23-6; Manufacturer: STMicroelectronics; Output Voltage: 18V; Output Current: 100mA; Min Supply Voltage: 1.7V; Quiescent Current: 150A; Reference Voltage: 1.234V; Supplier 1: Digi-Key; Manufacturer Part Number: TSM1052; Stock 1: 1632; Pricing 1: 1=0.68, 10=0.594, 25=0.558, 100=0.423, 250=0.36, 500=0.342, 1000=0.261 (USD); Mount: Surface Mount; Case/Package: SOT-23; Number of Pins: 6; Weight: 0.00709oz; Min Operating Temperature: -10°C; Max Operating Temperature: 85°C; Packaging: Tape and Reel; Package Quantity: 3000; Max Supply Voltage: 18V; Voltage Rating: 18V; Length: 3.05mm; Height: 1.3mm; Width: 1.75mm; Radiation Hardening: No; Lead Free: Lead Free; REACH SVHC: No SVHC; ComponentLink1URL: http://www.st.com/web/en/resource/technical/document/datasheet/CD00152575.pdf?src-supplier=Digi-Key; ComponentLink1Description: http://www.st.com/web/en/resource/technical/document/datasheet/CD00152575.pdf?src-supplier=Digi-Key; ComponentLink2URL: http://www.farnell.com/datasheets/1700292.pdf?src-supplier=Element14; ComponentLink2Description: http://www.farnell.com/datasheets/1700292.pdf?src-supplier=Element14; ComponentLink3URL: http://www.st.com/content/ccc/resource/technical/document/datasheet/a6/0f/5c/80/87/ac/4b/ec/CD00152575.pdf/files/CD00152575.pdf/jcr:content/translations/en.CD00152575.pdf?src-supplier=Digi-Key; ComponentLink3Description: http://www.st.com/content/ccc/resource/technical/document/datasheet/a6/0f/5c/80/87/ac/4b/ec/CD00152575.pdf/files/CD00152575.pdf/jcr:content/translations/en.CD00152575.pdf?src-supplier=Digi-Key; ComponentLink4URL: http://www.mouser.com/ds/2/389/tsm1052-974404.pdf?src-supplier=Mouser; ComponentLink4Description: http://www.mouser.com/ds/2/389/tsm1052-974404.pdf?src-supplier=Mouser; ComponentLink5URL: http://datasheet.iiic.cc/stmicroelectronics/TSM1052.pdf?src-supplier=IIIC; ComponentLink5Description: http://datasheet.iiic.cc/stmicroelectronics/TSM1052.pdf?src-supplier=IIIC; Supplier Part Number 1: 497-6034-1-ND
footprint SOT-23-6 (IC BAT CHG LI-ION 1 CELL SOT23-6)
pins: 1 Vctrl, 2 GND, 3 OUT, 4 Ictrl, 5 Vsense, 6 Vcc

## UCD1C102MNL1GS
designator C?, comment 1000uF
CAP ALUM 1000UF 20% 16V SMD; Manufacturer: Nichicon; Manufacturer Part Number: UCD1C102MNL1GS; Ripple Current: 950mA; Capacitance: 1mF; Life (Hours): 5000Hour; Leakage Current: 3uA; Dissipation Factor: 0.16%; Polarity: Polar; Impedance: 80mR; Supplier 1: Digi-Key; Stock 1: 10424; Pricing 1: 1=0.96, 10=0.756, 100=0.5671 (USD); Mount: Surface Mount; Case/Package: Radial; Min Operating Temperature: -55°C; Max Operating Temperature: 105°C; Tolerance: 20%; Voltage Rating (DC): 16V; Packaging: Tape and Reel; Package Quantity: 400; Termination: SMD/SMT; Voltage Rating: 16V; Diameter: 10mm; Length: 13.5mm; Height: 13.5mm; Height - Seated (Max): 0.551inch; Radiation Hardening: No; ComponentLink1URL: http://www.nichicon.co.jp/english/products/pdfs/e-cd.pdf?src-supplier=Avnet+Europe; ComponentLink1Description: http://www.nichicon.co.jp/english/products/pdfs/e-cd.pdf?src-supplier=Avnet+Europe; Supplier Part Number 1: 493-14520-1-ND
footprint UCD1C102MNL1GS
pins: 1, 2

## ULR2G4R7MNL1GS
designator C?, comment 4.7uF
CAP ALUM 4.7UF 20% 400V SMD; Manufacturer: Nichicon; Manufacturer Part Number: ULR2G4R7MNL1GS; Ripple Current: 35mA; Leakage Current: 100uA; Life (Hours): 3000Hour; Dissipation Factor: 0.25%; Supplier 1: Digi-Key; Stock 1: 114879; Pricing 1: 1=0.84, 10=0.636, 100=0.4549 (USD); Mount: Surface Mount; Case/Package: SMD/SMT; Min Operating Temperature: -40°C; Max Operating Temperature: 105°C; Voltage Rating (DC): 400V; Tolerance: 20%; Capacitance: 4.7uF; Packaging: Tape and Reel; Package Quantity: 500; Termination: SMD/SMT; Voltage Rating: 400V; Voltage: 400V; Diameter: 10mm; Length: 10mm; Height: 10mm; Height - Seated (Max): 0.433inch; Lead Pitch: 4.5mm; Lead Free: Lead Free; ComponentLink1URL: http://www.nichicon.co.jp/english/products/pdfs/e-ch_ref.pdf?src-supplier=Digi-Key; ComponentLink1Description: http://www.nichicon.co.jp/english/products/pdfs/e-ch_ref.pdf?src-supplier=Digi-Key; ComponentLink2URL: http://nichicon-us.com/english/products/pdfs/e-ulr.pdf?src-supplier=Digi-Key; ComponentLink2Description: http://nichicon-us.com/english/products/pdfs/e-ulr.pdf?src-supplier=Digi-Key; Supplier Part Number 1: 493-6709-1-ND
footprint ULR2G4R7MNL1GS
pins: 1, 2

## US1K-TP
designator D?
DIODE GEN PURP 800V 1A DO214AC; Manufacturer: MCC; Max Surge Current: 30A; Forward Voltage: 1.7V; Recovery Time: 75ns; Peak Reverse Current: 10uA; Element Configuration: Single; Supplier 1: Digi-Key; Manufacturer Part Number: US1K-TP; Stock 1: 19582; Pricing 1: 1=0.36, 10=0.275, 25=0.2476, 100=0.1305, 250=0.12916, 500=0.11566, 1000=0.09, 2500=0.08235 (USD); Mount: Surface Mount; Number of Pins: 2; Min Operating Temperature: -65°C; Max Operating Temperature: 175°C; Forward Current: 1A; Package Quantity: 1; Packaging: Tape and Reel; Average Rectified Current: 1A; Reverse Recovery Time: 75ns; Max Repetitive Reverse Voltage (Vrrm): 800V; Max Forward Surge Current (Ifsm): 30A; Peak Non-Repetitive Surge Current: 30A; Max Reverse Voltage (DC): 800V; Reverse Voltage: 800V; Length: 4.6mm; Height: 2.24mm; Width: 2.92mm; REACH SVHC: Unknown; Lead Free: Lead Free; ComponentLink1URL: http://www.mccsemi.com/up_pdf/US1A-US1M(DO-214AC).pdf?src-supplier=Digi-Key; ComponentLink1Description: http://www.mccsemi.com/up_pdf/US1A-US1M(DO-214AC).pdf?src-supplier=Digi-Key; ComponentLink2URL: http://www.mccsemi.com/up_pdf/US1A-US1M(DO-214AC).pdf?src-supplier=Future+Electronics; ComponentLink2Description: http://www.mccsemi.com/up_pdf/US1A-US1M(DO-214AC).pdf?src-supplier=Future+Electronics; Supplier Part Number 1: US1K-TPMSCT-ND
footprint DO214AC
pins: 1 A, 2 K

## VIPER17HDTR
designator U?
IC OFFLINE CONV PWM OVP 16SOIC; Manufacturer: STMicroelectronics; Output Voltage: 800V; Min Supply Voltage: 8.5V; Max Supply Voltage: 23.5V; Output Current: 420mA; Output Power: 10W; Switching Frequency: 115kHz; Max Duty Cycle: 80%; Operating Supply Current: 1.8mA; Number of Outputs: 1; Isolation: Isolated; Max Power Dissipation: 12W; Topology: Flyback; Supplier 1: Digi-Key; Manufacturer Part Number: VIPER17HDTR; Stock 1: 1628; Pricing 1: 1=1.1, 10=0.98, 25=0.93, 100=0.714, 250=0.631, 500=0.5978, 1000=0.46495 (USD); Mount: Surface Mount; Case/Package: SOIC; Number of Pins: 16; Weight: 0.023492oz; Min Operating Temperature: -40°C; Max Operating Temperature: 150°C; Packaging: Tape and Reel; Package Quantity: 1; Breakdown Voltage: 800V; Length: 9.9mm; Height: 1.47mm; Width: 3.9mm; Radiation Hardening: No; Lead Free: Lead Free; ComponentLink1URL: http://uk.rs-online.com/webdocs/0dbf/0900766b80dbfd31.pdf?src-supplier=RSComponents; ComponentLink1Description: http://uk.rs-online.com/webdocs/0dbf/0900766b80dbfd31.pdf?src-supplier=RSComponents; ComponentLink2URL: http://www.st.com/web/en/resource/technical/document/datasheet/CD00185039.pdf?src-supplier=Avnet+Europe; ComponentLink2Description: http://www.st.com/web/en/resource/technical/document/datasheet/CD00185039.pdf?src-supplier=Avnet+Europe; ComponentLink3URL: http://www.st.com/content/ccc/resource/technical/document/datasheet/be/0b/b1/be/53/ef/4f/78/CD00185039.pdf/files/CD00185039.pdf/_jcr_content/translations/en.CD00185039.pdf?src-supplier=Digi-Key; ComponentLink3Description: http://www.st.com/content/ccc/resource/technical/document/datasheet/be/0b/b1/be/53/ef/4f/78/CD00185039.pdf/files/CD00185039.pdf/_jcr_content/translations/en.CD00185039.pdf?src-supplier=Digi-Key; ComponentLink4URL: https://www.verical.com/server-webapp/html/getDatasheet?partID=189260&src-supplier=Verical; ComponentLink4Description: https://www.verical.com/server-webapp/html/getDatasheet?partID=189260&src-supplier=Verical; Supplier Part Number 1: 497-7045-1-ND
footprint 16-SO
pins: 1 GND, 2 GND, 3 NC, 4 N.A., 5 VDD, 6 CONT, 7 FB, 8 NC, 9 NC, 10 BR, 11 NC, 12 NC, 13 DRAIN, 14 DRAIN, 15 DRAIN, 16 DRAIN